# Altium footprint library USB A-Female.PcbLib: 1 footprints
Each footprint in its own frame and in the unit in brackets; x right, y up, seen from the top. Pads: shape width x height; smd on the part's side, far side on the other; paste and mask are expansions set on the pad; w line width, h text height; cw(c..) or ccw(c..) is an arc to the next point about the centre after c.
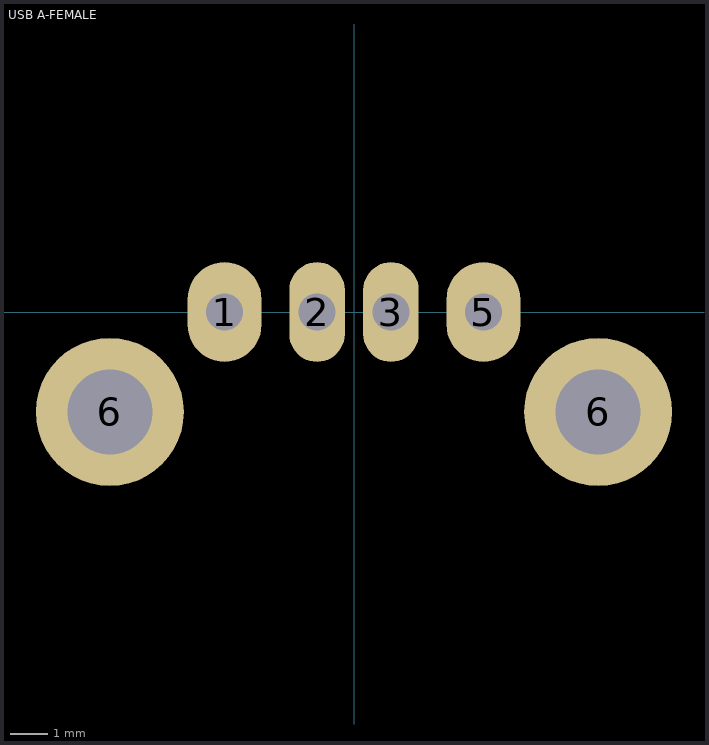
[diagram p0: the footprint, top view; thin cyan lines are the x and y axes]

## USB A-FEMALE [mm]
pads (6):
  oval 2x2.7 hole 1: 1(-3.5,0) 5(3.5,0)
  oval 1.5x2.7 hole 1: 2(-1,0) 3(1,0)
  round 4 hole 2.3: 6(-6.6,-2.7) 6(6.6,-2.7)
3D body "User Library-USB-A-01.step": height 6.95, standoff -4.2, extent -7.9,-12.4 7.9,1.3